# Altium schematic symbol library SMCJ18CA.SchLib: 1 symbol
Pins are listed as number, name and electrical type; pins without a type are passive.

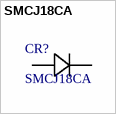
[diagram p0: symbol SMCJ18CA]

## SMCJ18CA
designator CR?
No Description Available; Manufacturer_Name: Littelfuse Inc; Copyright: Copyright (C) 2026 Ultra Librarian. All rights reserved.; Manufacturer_Part_Number: SMCJ18CA
footprint SMCJSeries_LTF
pins: 1, 2